# Altium footprint library FootPrintLib_12.PcbLib: 319 footprints (part 1 of 20)
Each footprint in its own frame and in the unit in brackets; x right, y up, seen from the top. Pads: shape width x height; smd on the part's side, far side on the other; paste and mask are expansions set on the pad; w line width, h text height; cw(c..) or ccw(c..) is an arc to the next point about the centre after c.
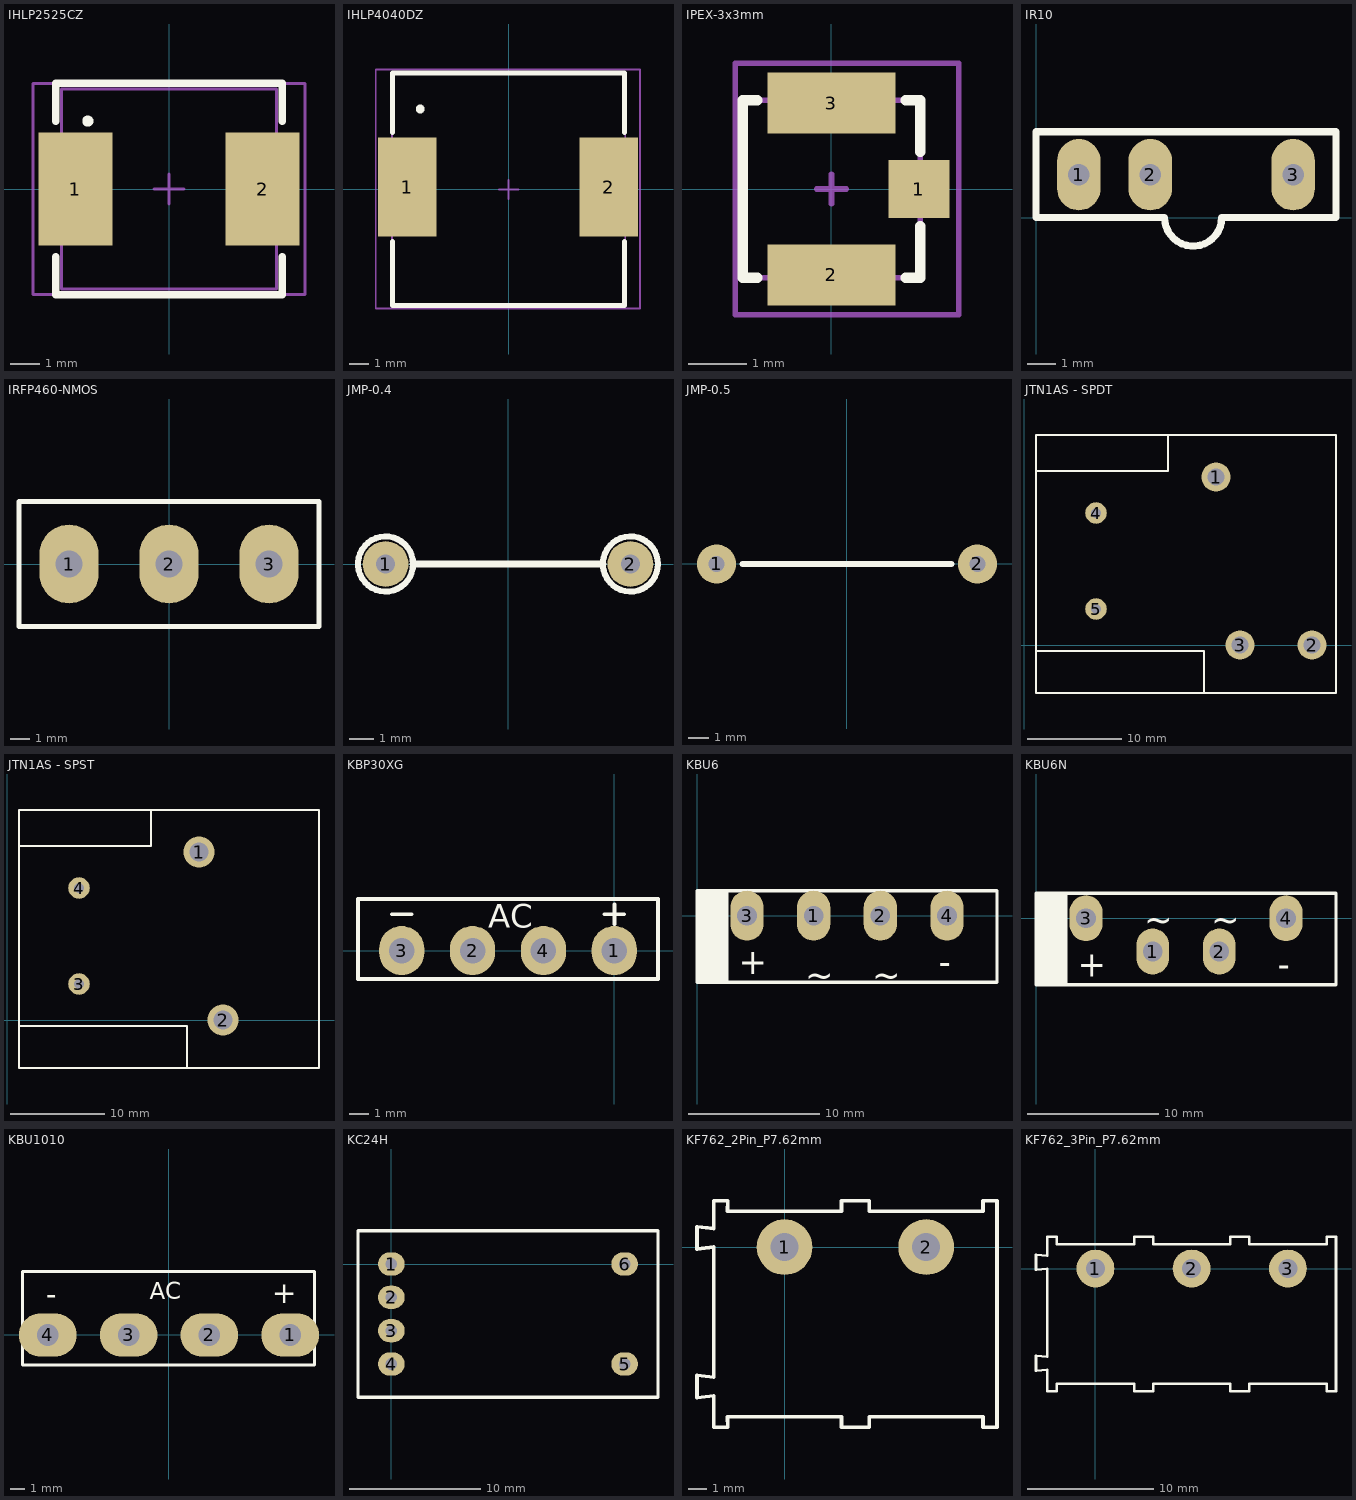
[diagram p0: the footprints below, top view; thin cyan lines are the x and y axes]

## IHLP2525CZ [mm] "Vishay IHLP2525CZ SMT Inductor,6.86x6.86x3mm"
height 3
pads (2):
  rect 2.5x3.8 smd: 1(-3.151,0) 2(3.151,0)
Top Overlay:
  circle w0.254: c-2.734,2.286 r0.06
  lines w0.254: -3.81,-2.286 -3.81,-3.556 3.81,-3.556 3.81,-2.286 ; -3.81,2.286 -3.81,3.556 3.81,3.556 3.81,2.286
Mechanical 13:
  lines w0.1: -3.621,-3.362 -3.621,3.362 3.621,3.362 3.621,-3.362 -3.621,-3.362
Mechanical 15:
  lines w0.1: -0.5,0 0.5,0 ; 0,-0.5 0,0.5 ; -4.572,-3.556 4.572,-3.556 4.572,3.556 -4.572,3.556 -4.572,-3.556
3D body: height 1, standoff 0, extent -3.81,-1.905 -1.905,1.905
3D body: height 1, standoff 0, extent 1.905,-1.905 3.81,1.905
3D body: height 3, standoff 0, extent -3.683,-3.429 3.683,3.429

## IHLP4040DZ [mil] "Vishay HLP4040 SMT Inductor,11.5x11.5x4mm"
height 157.48
pads (2):
  rect 118.11x200 smd: 1(-205,5) 2(202.5,5)
Top Overlay:
  circle w10: c-178.98,163 r4.02
  lines w10: -235,-105 -235,-235 235,-235 235,-105 ; -235,115 -235,236 235,236 235,115
Mechanical 13:
  lines w3.94: -236.22,-236.22 236.22,-236.22 236.22,236.22 -236.22,236.22 -236.22,-236.22
Mechanical 15:
  lines w3.94: -19.69,0 19.68,0 ; 0,-19.68 0,19.69 ; -269,-241 -269,243 266,243 266,-241 -269,-241
3D body: height 157.48, standoff 0, extent -236,-235 235,236

## IPEX-3x3mm [mm] "U.FL-R-SMT"
height 1.25
pads (3):
  rect 1.05x1 smd: 1(1.5,0)
  rect 2.2x1.05 smd mask+0.102: 2(0,-1.475)
  rect 2.2x1.05 smd: 3(0,1.475)
Top Overlay:
  lines w0.178: -1.27,-1.524 -1.524,-1.524 -1.524,1.524 -1.27,1.524 ; 1.27,-1.524 1.524,-1.524 1.524,-0.635 ; 1.27,1.524 1.524,1.524 1.524,0.635
Mechanical 13:
  lines w0.1: -1.524,-1.524 -1.524,1.524 1.524,1.524 1.524,-1.524 -1.524,-1.524
Mechanical 15:
  lines w0.1: -0.254,0 0.254,0 ; 0,-0.254 0,0.254 ; -1.651,-2.159 -1.651,2.159 2.184,2.159 2.184,-2.159 -1.651,-2.159
3D body "User Library-U_FL-R-SMT-1.step": height 1.25, standoff -0.01, extent -1.55,-1.5 1.55,1.5

## IR10 [mm]
pads (3):
  oval 1.524x2.5 hole 0.762: 1(1.5,1.5) 2(4,1.5) 3(9,1.5)
Top Overlay:
  lines w0.254: 0,0 0,3 10.5,3 10.5,0 6.5,0 cw(c5.5,0) 4.5,0 0,0

## IRFP460-NMOS [mm] "IRFP460-NMOS"
height 20
pads (3):
  oval 3x4 hole 1.35: 1(-5.08,0) 2(0,0) 3(5.08,0)
Top Overlay:
  lines w0.254: -7.62,-3.175 -7.62,3.175 7.62,3.175 7.62,-3.175 -7.62,-3.175
3D body "User Library-TO-247H Bent Lead.step": height 5.3, standoff -6.6, extent -7.75,-25.019 7.75,0.381

## JMP-0.4 [mm]
pads (2):
  round 1.9 hole 0.8: 1(-5.08,0) 2(5.08,0)
Top Overlay:
  circle w0.254: c-5.08,0 r1.143
  circle w0.254: c5.08,0 r1.143
  lines w0.305: -3.937,0 3.937,0

## JMP-0.5 [mm]
pads (2):
  round 1.9 hole 0.8: 1(-6.35,0) 2(6.35,0)
Top Overlay:
  lines w0.305: -5.08,0 5.08,0

## JTN1AS - SPDT [mil]
pads (5):
  round 120 hole 70.87: 1(800,700) 2(1200,0) 3(900,0)
  round 90 hole 40: 4(300,550) 5(300,150)
Top Overlay:
  lines w10: 50,-25 750,-25 750,-200 ; 50,725 600,725 600,875 ; 50,-200 50,875 1300,875 1300,-200 50,-200

## JTN1AS - SPST [mil]
pads (4):
  round 130 hole 78.74: 1(800,700) 2(900,0)
  round 90 hole 40: 3(300,150) 4(300,550)
Top Overlay:
  lines w10: 50,-25 750,-25 750,-200 ; 50,725 600,725 600,875 ; 50,-200 1300,-200 1300,875 50,875 50,-200

## KBP30XG [mm] "Glass Passivated Single-Phase Bridge Rectifier 3A"
height 11.68
pads (4):
  oval 2.3x2.5 hole 1.3: 1(0,0) 2(-7.2,0) 3(-10.8,0) 4(-3.6,0)
Top Overlay:
  lines w0.2: -11.3,1.848 -10.3,1.848 ; -0.5,1.848 0.5,1.848 ; 0,1.348 0,2.348 ; -13.02,-1.448 -13.02,2.63 2.22,2.63 2.22,-1.448 -13.02,-1.448
  text "AC" at -6.401,1.168 h1.2

## KBU6 [mm]
pads (4):
  oval 2.54x3.81 hole 1.5: 1(8.89,0) 2(13.97,0) 3(3.81,0) 4(19.05,0)
Top Overlay:
  lines w0.254: 0.254,-5.08 0.254,1.905 ; 0.508,-5.08 0.508,1.905 ; 0.762,-5.08 0.762,1.905 ; 1.016,-5.08 1.016,1.905 ; 1.27,-5.08 1.27,1.905 ; 1.524,-5.08 1.524,1.905 ; 1.778,-5.08 1.778,1.905 ; 2.032,-5.08 2.032,1.905 ; 2.286,-5.08 2.286,1.905 ; 0,-5.08 0,1.905 22.86,1.905 22.86,-5.08 0,-5.08
  text "~" at 13.335,-5.461 h1.91
  text "~" at 8.255,-5.461 h1.91
  text "-" at 18.415,-4.445 h1.91
  text "+" at 3.175,-4.445 h1.91

## KBU6N [mm]
pads (4):
  oval 2.5x3.5 hole 1.5: 1(8.89,-2.54) 2(13.97,-2.54) 3(3.81,0) 4(19.05,0)
Top Overlay:
  lines w0.254: 0.254,-5.08 0.254,1.905 ; 0.508,-5.08 0.508,1.905 ; 0.762,-5.08 0.762,1.905 ; 1.016,-5.08 1.016,1.905 ; 1.27,-5.08 1.27,1.905 ; 1.524,-5.08 1.524,1.905 ; 1.778,-5.08 1.778,1.905 ; 2.032,-5.08 2.032,1.905 ; 2.286,-5.08 2.286,1.905 ; 0,-5.08 22.86,-5.08 22.86,1.905 0,1.905 0,-5.08
  text "+" at 3.175,-4.445 h1.91
  text "-" at 18.415,-4.445 h1.91
  text "~" at 8.255,-1.016 h1.91
  text "~" at 13.335,-1.016 h1.91

## KBU1010 [mm] "Bridge Rectifiers, Lead Spacing 4mm"
height 16.5
pads (4):
  oval 4x3 hole 1.5: 1(8.4,0) 2(2.8,0) 3(-2.8,0) 4(-8.4,0)
Top Overlay:
  lines w0.2: -10.15,-2.09 -10.15,4.41 10.1,4.41 10.1,-2.09 -10.15,-2.09
  text "AC" at -1.35,2.1 h2
  text "-" at -7.775,3.25 h1.5
  text "+" at 8.85,3.5 h1.5
3D body: height 0.25, standoff -18, extent 4.185,4.085 4.185,4.085
3D body: height 0.25, standoff -18, extent 3.81,3.785 3.81,3.785
3D body "User Library-Silicon Bridge Rectifiers KBU1010.STEP": height 18.95, standoff -23.35, extent -11.74,-2.34 11.46,4.61

## KC24H [mil] "LED Driver"
pads (6):
  oval 80x70 hole 35.43: 1(0,0) 2(0,-100) 3(0,-200) 4(0,-300) 5(700,-300) 6(700,0)
Top Overlay:
  lines w10: -100,-400 800,-400 800,100 -100,100 -100,-400

## KF762_2Pin_P7.62mm [mm] "Terminal Block; 2Pin; Pitch 7.62mm; Body 1614x1220mm"
height 12.4
pads (2):
  round 3 hole 1.5: 1(0,0) 2(7.62,0)
Top Overlay:
  lines w0.2: 10.68,-9.125 4.56,-9.125 4.56,-9.7 3.06,-9.7 3.06,-9.125 -3.065,-9.125 -3.06,-9.7 -3.81,-9.7 -3.81,-8 -4.71,-8.1 -4.71,-6.9 -3.81,-7 -3.81,0 -4.71,-0.1 -4.71,1.1 -3.81,1 -3.81,2.5 -3.06,2.5 -3.065,1.925 3.06,1.925 3.06,2.5 4.56,2.5 4.56,1.925 10.68,1.925 ; 10.68,-9.125 10.68,-9.7 11.43,-9.7 11.43,2.5 10.68,2.5 10.68,1.925
3D body "TBC762_2Pin.step": height 12.4, standoff -2.7, extent -4.71,-9.7 11.43,2.5

## KF762_3Pin_P7.62mm [mm] "Terminal Block; 3Pin; Pitch 7.62mm; Body 2376x1220mm"
height 12.4
pads (3):
  round 3 hole 1.5: 1(0,0) 2(7.62,0) 3(15.24,0)
Top Overlay:
  lines w0.2: 18.3,-9.125 12.18,-9.125 12.18,-9.7 10.68,-9.7 10.68,-9.125 4.56,-9.125 4.56,-9.7 3.06,-9.7 3.06,-9.125 -3.065,-9.125 -3.06,-9.7 -3.81,-9.7 -3.81,-8 -4.71,-8.1 -4.71,-6.9 -3.81,-7 -3.81,0 -4.71,-0.1 -4.71,1.1 -3.81,1 -3.81,2.5 -3.06,2.5 -3.065,1.925 3.06,1.925 3.06,2.5 4.56,2.5 4.56,1.925 10.68,1.925 10.68,2.5 12.18,2.5 12.18,1.925 18.3,1.925 ; 18.3,-9.125 18.3,-9.7 19.05,-9.7 19.05,2.5 18.3,2.5 18.3,1.925
3D body "TBC762_3Pin.step": height 12.4, standoff -2.7, extent -4.71,-9.7 19.05,2.5